# Altium footprint library 4.90 ws2812封装.PcbLib: 2 footprints
Each footprint in its own frame and in the unit in brackets; x right, y up, seen from the top. Pads: shape width x height; smd on the part's side, far side on the other; paste and mask are expansions set on the pad; w line width, h text height; cw(c..) or ccw(c..) is an arc to the next point about the centre after c.
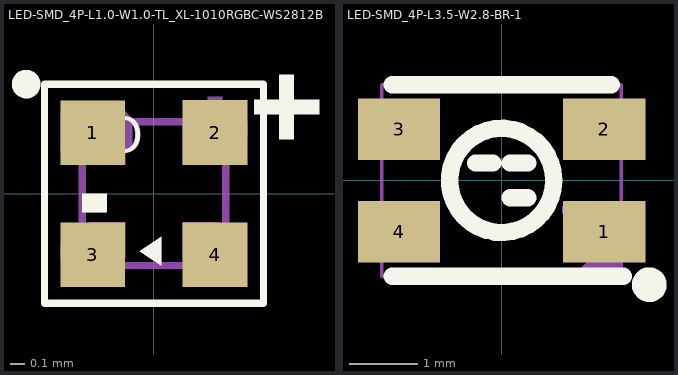
[diagram p0: the footprints below, top view; thin cyan lines are the x and y axes]

## LED-SMD_4P-L1.0-W1.0-TL_XL-1010RGBC-WS2812B [mm]
pads (4):
  rect 0.45x0.45 smd: 1(-0.425,0.425) 2(0.425,0.425) 3(-0.425,-0.425) 4(0.425,-0.425)
Top Overlay:
  circle w0.1: c-0.889,0.762 r0.05
  region: 0.05,-0.5 -0.1,-0.4 0.05,-0.3
  region: 0.873,0.377 0.973,0.377 0.973,0.827 0.873,0.827
  region: 0.698,0.652 0.698,0.552 1.148,0.552 1.148,0.652
  region: -0.5,0 -0.5,-0.13 -0.34,-0.13 -0.33,-0.13 -0.33,0
  lines w0.051: -0.762,-0.762 -0.762,0.762 0.762,0.762 0.762,-0.762 0.39,-0.762 -0.378,-0.762 -0.762,-0.762
  text "DO" at -0.603,0.283 h0.25
  text "DI" at 0.297,-0.566 h0.25
Mechanical 6:
  drawing of 12 lines, arcs and shapes, not listed
Mechanical 15:
  region: -0.44,0.5 -0.44,0.475 -0.475,0.44 -0.525,0.44 -0.56,0.475 -0.56,0.5 -0.56,0.525 -0.525,0.56 -0.475,0.56 -0.44,0.525 -0.44,0.5
  region: -0.2,-0.45 -0.45,-0.45 -0.45,-0.2 -0.2,-0.2
  region: 0.45,-0.2 0.45,-0.45 0.2,-0.45 0.2,-0.2
  region: -0.45,0.2 -0.45,0.45 -0.2,0.45 -0.2,0.2
  region: 0.2,0.45 0.45,0.45 0.45,0.2 0.2,0.2
  lines w0.051: -0.5,-0.5 -0.5,0.5 0.5,0.5 0.5,-0.5 -0.5,-0.5
3D body "U1~LED-SMD_4P-L1.0-W1.0-TL_XL-1010RGBC-WS2812B~LED-SMD_4P-L1.0-W1.0-TL_XL-1010RGBC-WS2812B~G6Vs.STEP": height 0.81, standoff 0, extent -0.5,-0.5 0.5,0.5

## LED-SMD_4P-L3.5-W2.8-BR-1 [mm]
pads (4):
  rect 1.2x0.9 smd paste+0.051: 1(1.5,-0.75) 2(1.5,0.75) 3(-1.5,0.75) 4(-1.5,-0.75)
Top Overlay:
  circle w0.254: c0,0 r0.762
  circle w0.254: c2.159,-1.524 r0.127
  lines w0.254: -1.6,-1.4 1.6,-1.4 1.778,-1.4 ; -1.6,1.4 1.6,1.4 ; -0.381,0.254 -0.127,0.254 ; 0.127,-0.254 0.381,-0.254 ; 0.127,0.254 0.381,0.254
Mechanical 2:
  region: -1.274,-0.562 -1.324,-0.612 -1.324,-0.912 -1.274,-0.962 -1.074,-0.962 -1.024,-0.912 -1.024,-0.612 -1.074,-0.562 -1.174,-0.562 -1.174,-0.612 -1.074,-0.612 -1.074,-0.912 -1.274,-0.912 -1.274,-0.612 -1.224,-0.612 -1.224,-0.562
  region: -1.649,-0.562 -1.649,-0.962 -1.499,-0.962 -1.449,-0.962 -1.399,-0.912 -1.399,-0.612 -1.449,-0.562 -1.549,-0.562 -1.549,-0.612 -1.449,-0.612 -1.449,-0.912 -1.599,-0.912 -1.599,-0.562
  region: 1.322,0.562 1.322,0.612 1.372,0.612 1.372,0.912 1.322,0.912 1.322,0.962 1.472,0.962 1.472,0.912 1.422,0.912 1.422,0.612 1.472,0.612 1.472,0.562
  region: 1.022,0.962 1.022,0.562 1.172,0.562 1.222,0.562 1.272,0.612 1.272,0.912 1.222,0.962 1.122,0.962 1.122,0.912 1.222,0.912 1.222,0.612 1.072,0.612 1.072,0.962
  region: -1.697,0.812 -1.097,0.812 -1.097,0.712 -1.697,0.712
  region: -1.447,0.462 -1.447,1.062 -1.347,1.062 -1.347,0.462
  region: 0.889,-0.381 1.489,-0.381 1.489,-0.481 0.889,-0.481
  region: 1.74,-1.4 1.74,-0.71 1.73,-0.71 1.04,-1.4
Mechanical 6:
  lines w0.051: -1.75,-1.4 -1.75,1.4 1.75,1.4 1.75,-1.4 -1.75,-1.4
Mechanical 8:
  region: 1.81,-1.4 1.81,-1.425 1.775,-1.46 1.725,-1.46 1.69,-1.425 1.69,-1.4 1.69,-1.375 1.725,-1.34 1.775,-1.34 1.81,-1.375 1.81,-1.4
Mechanical 9:
  region: -0.95,-1.1 -1.75,-1.1 -1.75,-0.4 -0.95,-0.4
  region: -0.95,0.4 -1.75,0.4 -1.75,1.1 -0.95,1.1
  region: 1.75,0.4 0.95,0.4 0.95,1.1 1.75,1.1
  region: 1.75,-1.1 0.95,-1.1 0.95,-0.4 1.75,-0.4
3D body "ws3528.STEP": height 1.86, standoff 0.01, extent -1.75,-1.4 1.75,1.4